# Altium footprint library Package_DFN_QFN.PcbLib: 735 footprints (part 12 of 46)
Each footprint in its own frame and in the unit in brackets; x right, y up, seen from the top. Pads: shape width x height; smd on the part's side, far side on the other; paste and mask are expansions set on the pad; w line width, h text height; cw(c..) or ccw(c..) is an arc to the next point about the centre after c.
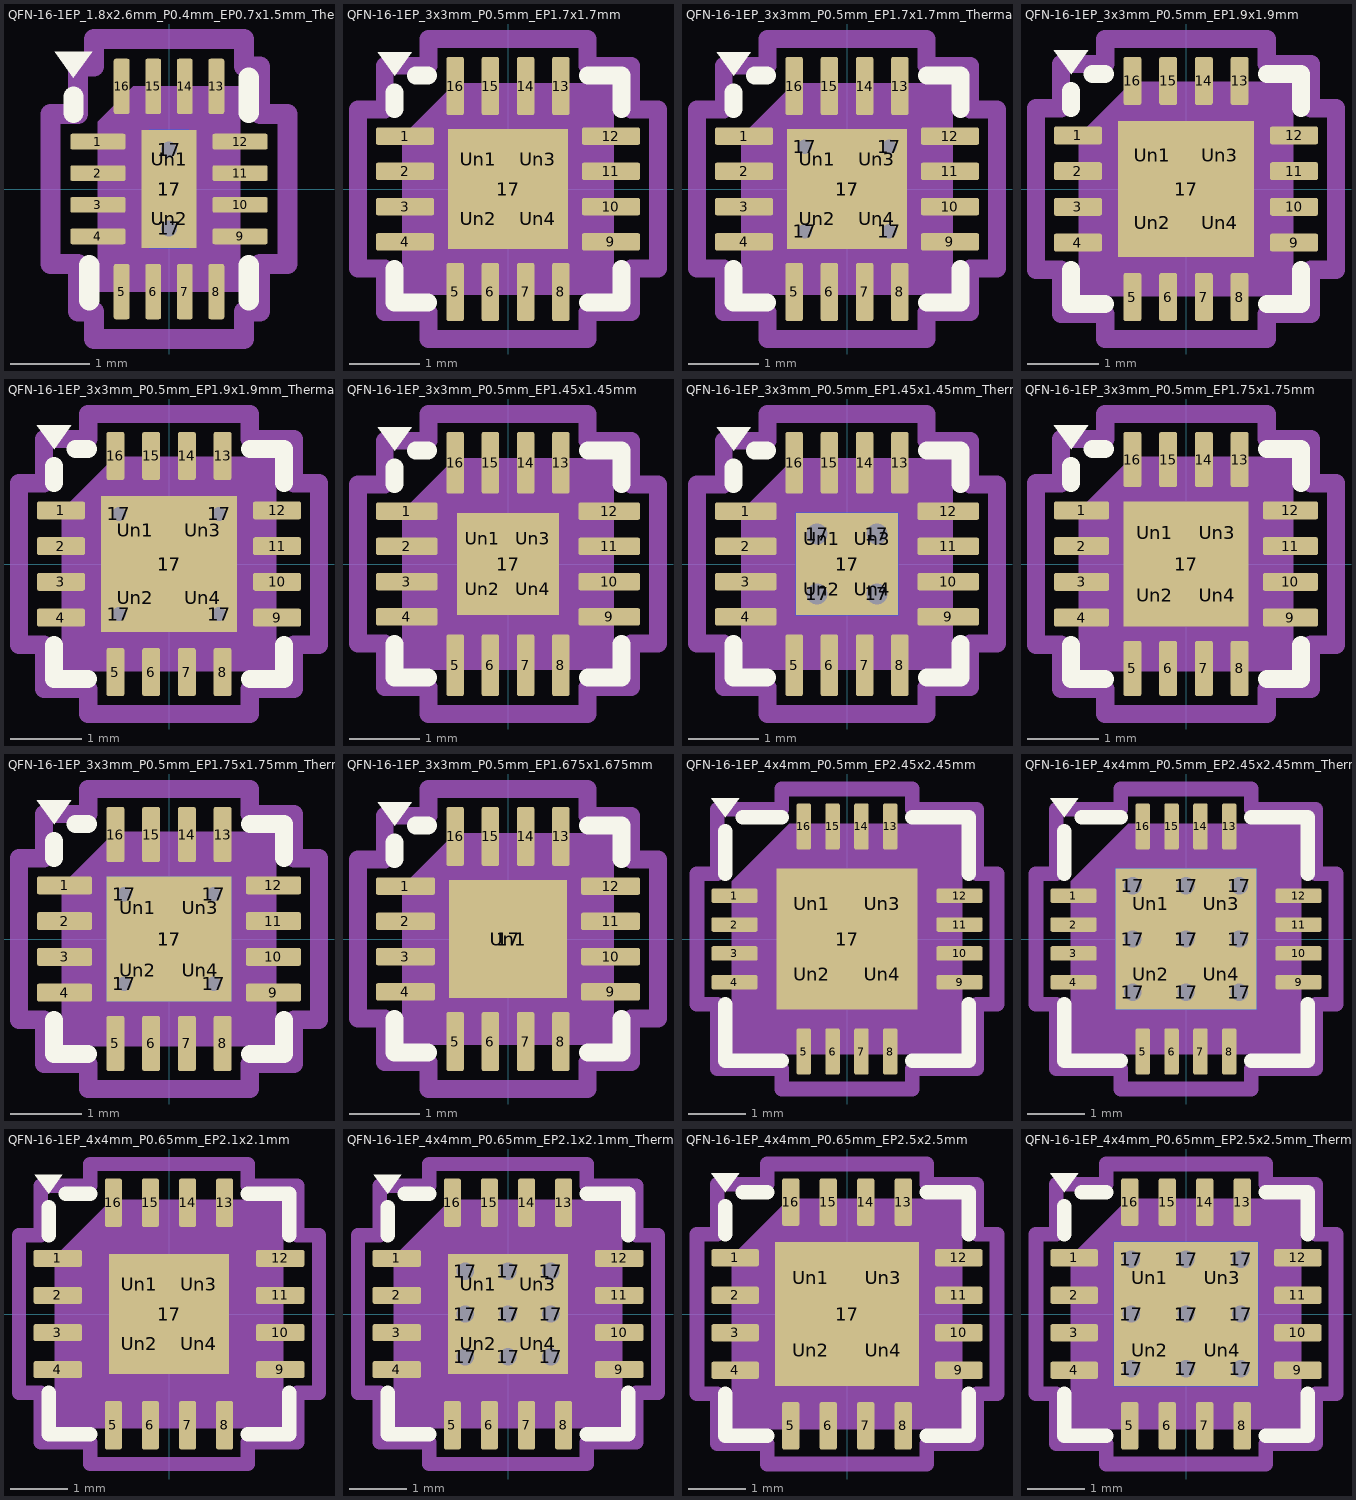
[diagram p11: the footprints below, top view; thin cyan lines are the x and y axes]

## QFN-16-1EP_1.8x2.6mm_P0.4mm_EP0.7x1.5mm_ThermalVias [mm] "QFN-16-1EP_1.8x2.6mm_P0.4mm_EP0.7x1.5mm_ThermalVias"
pads (22):
  rrect25% 0.7x0.2 smd: 1(-0.9,0.6) 2(-0.9,0.2) 3(-0.9,-0.2) 4(-0.9,-0.6) 9(0.9,-0.6) 10(0.9,-0.2) 11(0.9,0.2) 12(0.9,0.6)
  rrect25% 0.2x0.7 smd: 5(-0.6,-1.3) 6(-0.2,-1.3) 7(0.2,-1.3) 8(0.6,-1.3) 13(0.6,1.3) 14(0.2,1.3) 15(-0.2,1.3) 16(-0.6,1.3)
  round 0.5 hole 0.2: 17(0,-0.5) 17(0,0.5)
  rect 0.7x1.5 smd: 17(0,0)
  rect 0.5x1.5 smd far side: 17(0,0)
  rrect25% 0.61x0.65 on Top Paste: Un1(0,0.375) Un2(0,-0.375)
F.SilkS:
  region: -1.21,1.41 -1.45,1.74 -0.97,1.74
  lines w0.254: -1.21,0.96 -1.21,1.17 ; -1.01,-1.41 -1.01,-0.96 ; 1.01,-1.41 1.01,-0.96 ; 1.01,0.96 1.01,1.41
Top Component Center:
  lines w0.127: -0.127,0 0.127,0 -0.127,0 ; 0,-0.127 0,0.127 0,-0.127
Top Assembly:
  region: 0.9,-1.3 -0.9,-1.3 -0.9,0.85 -0.45,1.3 0.9,1.3
Top Courtyard:
  lines w0.254: -1.5,-0.95 -1.15,-0.95 -1.15,-1.55 -0.95,-1.55 -0.95,-1.9 0.95,-1.9 0.95,-1.55 1.15,-1.55 1.15,-0.95 1.5,-0.95 1.5,0.95 1.15,0.95 1.15,1.55 0.95,1.55 0.95,1.9 -0.95,1.9 -0.95,1.55 -1.15,1.55 -1.15,0.95 -1.5,0.95 -1.5,-0.95
Top Designator:
  text ".Designator" at -2.251,-0.226 h1

## QFN-16-1EP_3x3mm_P0.5mm_EP1.7x1.7mm [mm] "QFN-16-1EP_3x3mm_P0.5mm_EP1.7x1.7mm"
pads (21):
  rrect25% 0.825x0.25 smd: 1(-1.462,0.75) 2(-1.462,0.25) 3(-1.462,-0.25) 4(-1.462,-0.75) 9(1.462,-0.75) 10(1.462,-0.25) 11(1.462,0.25) 12(1.462,0.75)
  rrect25% 0.25x0.825 smd: 5(-0.75,-1.462) 6(-0.25,-1.462) 7(0.25,-1.462) 8(0.75,-1.462) 13(0.75,1.462) 14(0.25,1.462) 15(-0.25,1.462) 16(-0.75,1.462)
  rect 1.7x1.7 smd: 17(0,0)
  rrect25% 0.69x0.69 on Top Paste: Un1(-0.425,0.425) Un2(-0.425,-0.425) Un3(0.425,0.425) Un4(0.425,-0.425)
F.SilkS:
  region: -1.61,1.61 -1.85,1.94 -1.37,1.94
  lines w0.254: -1.61,-1.135 -1.61,-1.61 -1.135,-1.61 ; -1.61,1.135 -1.61,1.37 ; -1.31,1.61 -1.135,1.61 ; 1.135,-1.61 1.61,-1.61 1.61,-1.135 ; 1.135,1.61 1.61,1.61 1.61,1.135
Top Component Center:
  lines w0.127: -0.127,0 0.127,0 -0.127,0 ; 0,-0.127 0,0.127 0,-0.127
Top Assembly:
  region: 1.5,-1.5 -1.5,-1.5 -1.5,0.75 -0.75,1.5 1.5,1.5
Top Courtyard:
  lines w0.254: -2.13,-1.13 -1.75,-1.13 -1.75,-1.75 -1.13,-1.75 -1.13,-2.13 1.13,-2.13 1.13,-1.75 1.75,-1.75 1.75,-1.13 2.13,-1.13 2.13,1.13 1.75,1.13 1.75,1.75 1.13,1.75 1.13,2.13 -1.13,2.13 -1.13,1.75 -1.75,1.75 -1.75,1.13 -2.13,1.13 -2.13,-1.13
Top Designator:
  text ".Designator" at -3.43,-0.344 h1.52
3D body "QFN-16-1EP_3x3mm_P0.5mm_EP1.7x1.7mm.step": height 0.78, standoff 0, extent -1.5,-1.5 1.5,1.5

## QFN-16-1EP_3x3mm_P0.5mm_EP1.7x1.7mm_ThermalVias [mm] "QFN-16-1EP_3x3mm_P0.5mm_EP1.7x1.7mm_ThermalVias"
pads (26):
  rrect25% 0.825x0.25 smd: 1(-1.462,0.75) 2(-1.462,0.25) 3(-1.462,-0.25) 4(-1.462,-0.75) 9(1.462,-0.75) 10(1.462,-0.25) 11(1.462,0.25) 12(1.462,0.75)
  rrect25% 0.25x0.825 smd: 5(-0.75,-1.462) 6(-0.25,-1.462) 7(0.25,-1.462) 8(0.75,-1.462) 13(0.75,1.462) 14(0.25,1.462) 15(-0.25,1.462) 16(-0.75,1.462)
  round 0.5 hole 0.2: 17(-0.6,-0.6) 17(-0.6,0.6) 17(0.6,-0.6) 17(0.6,0.6)
  rect 1.7x1.7 smd: 17(0,0)
  rect 1.7x1.7 smd far side: 17(0,0)
  rrect25% 0.69x0.69 on Top Paste: Un1(-0.425,0.425) Un2(-0.425,-0.425) Un3(0.425,0.425) Un4(0.425,-0.425)
F.SilkS:
  region: -1.61,1.61 -1.85,1.94 -1.37,1.94
  lines w0.254: -1.61,-1.135 -1.61,-1.61 -1.135,-1.61 ; -1.61,1.135 -1.61,1.37 ; -1.31,1.61 -1.135,1.61 ; 1.135,-1.61 1.61,-1.61 1.61,-1.135 ; 1.135,1.61 1.61,1.61 1.61,1.135
Top Component Center:
  lines w0.127: -0.127,0 0.127,0 -0.127,0 ; 0,-0.127 0,0.127 0,-0.127
Top Assembly:
  region: 1.5,-1.5 -1.5,-1.5 -1.5,0.75 -0.75,1.5 1.5,1.5
Top Courtyard:
  lines w0.254: -2.13,-1.13 -2.13,1.13 -1.75,1.13 -1.75,1.75 -1.13,1.75 -1.13,2.13 1.13,2.13 1.13,1.75 1.75,1.75 1.75,1.13 2.13,1.13 2.13,-1.13 1.75,-1.13 1.75,-1.75 1.13,-1.75 1.13,-2.13 -1.13,-2.13 -1.13,-1.75 -1.75,-1.75 -1.75,-1.13 -2.13,-1.13
Top Designator:
  text ".Designator" at -3.43,-0.344 h1.52
3D body "QFN-16-1EP_3x3mm_P0.5mm_EP1.7x1.7mm.step": height 0.78, standoff 0, extent -1.5,-1.5 1.5,1.5

## QFN-16-1EP_3x3mm_P0.5mm_EP1.9x1.9mm [mm] "QFN-16-1EP_3x3mm_P0.5mm_EP1.9x1.9mm"
pads (21):
  rrect25% 0.675x0.25 smd: 1(-1.512,0.75) 2(-1.512,0.25) 3(-1.512,-0.25) 4(-1.512,-0.75) 9(1.512,-0.75) 10(1.512,-0.25) 11(1.512,0.25) 12(1.512,0.75)
  rrect25% 0.25x0.675 smd: 5(-0.75,-1.512) 6(-0.25,-1.512) 7(0.25,-1.512) 8(0.75,-1.512) 13(0.75,1.512) 14(0.25,1.512) 15(-0.25,1.512) 16(-0.75,1.512)
  rect 1.9x1.9 smd: 17(0,0)
  rrect25% 0.77x0.77 on Top Paste: Un1(-0.475,0.475) Un2(-0.475,-0.475) Un3(0.475,0.475) Un4(0.475,-0.475)
F.SilkS:
  region: -1.61,1.61 -1.85,1.94 -1.37,1.94
  lines w0.254: -1.61,-1.135 -1.61,-1.61 -1.135,-1.61 ; -1.61,1.135 -1.61,1.37 ; -1.31,1.61 -1.135,1.61 ; 1.135,-1.61 1.61,-1.61 1.61,-1.135 ; 1.135,1.61 1.61,1.61 1.61,1.135
Top Component Center:
  lines w0.127: -0.127,0 0.127,0 -0.127,0 ; 0,-0.127 0,0.127 0,-0.127
Top Assembly:
  region: 1.5,-1.5 -1.5,-1.5 -1.5,0.75 -0.75,1.5 1.5,1.5
Top Courtyard:
  lines w0.254: -2.1,-1.13 -2.1,1.13 -1.75,1.13 -1.75,1.75 -1.13,1.75 -1.13,2.1 1.13,2.1 1.13,1.75 1.75,1.75 1.75,1.13 2.1,1.13 2.1,-1.13 1.75,-1.13 1.75,-1.75 1.13,-1.75 1.13,-2.1 -1.13,-2.1 -1.13,-1.75 -1.75,-1.75 -1.75,-1.13 -2.1,-1.13
Top Designator:
  text ".Designator" at -3.43,-0.344 h1.52
3D body "QFN-16-1EP_3x3mm_P0.5mm_EP1.8x1.8mm.step": height 0.77, standoff 0, extent -1.5,-1.5 1.5,1.5

## QFN-16-1EP_3x3mm_P0.5mm_EP1.9x1.9mm_ThermalVias [mm] "QFN-16-1EP_3x3mm_P0.5mm_EP1.9x1.9mm_ThermalVias"
pads (26):
  rrect25% 0.675x0.25 smd: 1(-1.512,0.75) 2(-1.512,0.25) 3(-1.512,-0.25) 4(-1.512,-0.75) 9(1.512,-0.75) 10(1.512,-0.25) 11(1.512,0.25) 12(1.512,0.75)
  rrect25% 0.25x0.675 smd: 5(-0.75,-1.512) 6(-0.25,-1.512) 7(0.25,-1.512) 8(0.75,-1.512) 13(0.75,1.512) 14(0.25,1.512) 15(-0.25,1.512) 16(-0.75,1.512)
  round 0.5 hole 0.2: 17(-0.7,-0.7) 17(-0.7,0.7) 17(0.7,-0.7) 17(0.7,0.7)
  rect 1.9x1.9 smd: 17(0,0)
  rect 1.9x1.9 smd far side: 17(0,0)
  rrect25% 0.82x0.82 on Top Paste: Un1(-0.475,0.475) Un2(-0.475,-0.475) Un3(0.475,0.475) Un4(0.475,-0.475)
F.SilkS:
  region: -1.61,1.61 -1.85,1.94 -1.37,1.94
  lines w0.254: -1.61,-1.135 -1.61,-1.61 -1.135,-1.61 ; -1.61,1.135 -1.61,1.37 ; -1.31,1.61 -1.135,1.61 ; 1.135,-1.61 1.61,-1.61 1.61,-1.135 ; 1.135,1.61 1.61,1.61 1.61,1.135
Top Component Center:
  lines w0.127: -0.127,0 0.127,0 -0.127,0 ; 0,-0.127 0,0.127 0,-0.127
Top Assembly:
  region: 1.5,-1.5 -1.5,-1.5 -1.5,0.75 -0.75,1.5 1.5,1.5
Top Courtyard:
  lines w0.254: -2.1,-1.13 -1.75,-1.13 -1.75,-1.75 -1.13,-1.75 -1.13,-2.1 1.13,-2.1 1.13,-1.75 1.75,-1.75 1.75,-1.13 2.1,-1.13 2.1,1.13 1.75,1.13 1.75,1.75 1.13,1.75 1.13,2.1 -1.13,2.1 -1.13,1.75 -1.75,1.75 -1.75,1.13 -2.1,1.13 -2.1,-1.13
Top Designator:
  text ".Designator" at -3.43,-0.344 h1.52
3D body "QFN-16-1EP_3x3mm_P0.5mm_EP1.8x1.8mm.step": height 0.77, standoff 0, extent -1.5,-1.5 1.5,1.5

## QFN-16-1EP_3x3mm_P0.5mm_EP1.45x1.45mm [mm] "QFN-16-1EP_3x3mm_P0.5mm_EP1.45x1.45mm"
pads (21):
  rrect25% 0.875x0.25 smd: 1(-1.438,0.75) 2(-1.438,0.25) 3(-1.438,-0.25) 4(-1.438,-0.75) 9(1.438,-0.75) 10(1.438,-0.25) 11(1.438,0.25) 12(1.438,0.75)
  rrect25% 0.25x0.875 smd: 5(-0.75,-1.438) 6(-0.25,-1.438) 7(0.25,-1.438) 8(0.75,-1.438) 13(0.75,1.438) 14(0.25,1.438) 15(-0.25,1.438) 16(-0.75,1.438)
  rect 1.45x1.45 smd: 17(0,0)
  rrect25% 0.58x0.58 on Top Paste: Un1(-0.36,0.36) Un2(-0.36,-0.36) Un3(0.36,0.36) Un4(0.36,-0.36)
F.SilkS:
  region: -1.61,1.61 -1.85,1.94 -1.37,1.94
  lines w0.254: -1.61,-1.135 -1.61,-1.61 -1.135,-1.61 ; -1.61,1.135 -1.61,1.37 ; -1.31,1.61 -1.135,1.61 ; 1.135,-1.61 1.61,-1.61 1.61,-1.135 ; 1.135,1.61 1.61,1.61 1.61,1.135
Top Component Center:
  lines w0.127: -0.127,0 0.127,0 -0.127,0 ; 0,-0.127 0,0.127 0,-0.127
Top Assembly:
  region: 1.5,-1.5 -1.5,-1.5 -1.5,0.75 -0.75,1.5 1.5,1.5
Top Courtyard:
  lines w0.254: -2.13,-1.13 -2.13,1.13 -1.75,1.13 -1.75,1.75 -1.13,1.75 -1.13,2.13 1.13,2.13 1.13,1.75 1.75,1.75 1.75,1.13 2.13,1.13 2.13,-1.13 1.75,-1.13 1.75,-1.75 1.13,-1.75 1.13,-2.13 -1.13,-2.13 -1.13,-1.75 -1.75,-1.75 -1.75,-1.13 -2.13,-1.13
Top Designator:
  text ".Designator" at -3.43,-0.344 h1.52
3D body "QFN-16-1EP_3x3mm_P0.5mm_EP1.7x1.7mm.step": height 0.78, standoff 0, extent -1.5,-1.5 1.5,1.5

## QFN-16-1EP_3x3mm_P0.5mm_EP1.45x1.45mm_ThermalVias [mm] "QFN-16-1EP_3x3mm_P0.5mm_EP1.45x1.45mm_ThermalVias"
pads (26):
  rrect25% 0.875x0.25 smd: 1(-1.438,0.75) 2(-1.438,0.25) 3(-1.438,-0.25) 4(-1.438,-0.75) 9(1.438,-0.75) 10(1.438,-0.25) 11(1.438,0.25) 12(1.438,0.75)
  rrect25% 0.25x0.875 smd: 5(-0.75,-1.438) 6(-0.25,-1.438) 7(0.25,-1.438) 8(0.75,-1.438) 13(0.75,1.438) 14(0.25,1.438) 15(-0.25,1.438) 16(-0.75,1.438)
  round 0.6 hole 0.3: 17(-0.425,-0.425) 17(-0.425,0.425) 17(0.425,-0.425) 17(0.425,0.425)
  rect 1.45x1.45 smd: 17(0,0)
  rect 1.45x1.45 smd far side: 17(0,0)
  rrect25% 0.63x0.63 on Top Paste: Un1(-0.36,0.36) Un2(-0.36,-0.36) Un3(0.36,0.36) Un4(0.36,-0.36)
F.SilkS:
  region: -1.61,1.61 -1.85,1.94 -1.37,1.94
  lines w0.254: -1.61,-1.135 -1.61,-1.61 -1.135,-1.61 ; -1.61,1.135 -1.61,1.37 ; -1.31,1.61 -1.135,1.61 ; 1.135,-1.61 1.61,-1.61 1.61,-1.135 ; 1.135,1.61 1.61,1.61 1.61,1.135
Top Component Center:
  lines w0.127: -0.127,0 0.127,0 -0.127,0 ; 0,-0.127 0,0.127 0,-0.127
Top Assembly:
  region: 1.5,-1.5 -1.5,-1.5 -1.5,0.75 -0.75,1.5 1.5,1.5
Top Courtyard:
  lines w0.254: -2.13,-1.13 -2.13,1.13 -1.75,1.13 -1.75,1.75 -1.13,1.75 -1.13,2.13 1.13,2.13 1.13,1.75 1.75,1.75 1.75,1.13 2.13,1.13 2.13,-1.13 1.75,-1.13 1.75,-1.75 1.13,-1.75 1.13,-2.13 -1.13,-2.13 -1.13,-1.75 -1.75,-1.75 -1.75,-1.13 -2.13,-1.13
Top Designator:
  text ".Designator" at -3.43,-0.344 h1.52
3D body "QFN-16-1EP_3x3mm_P0.5mm_EP1.7x1.7mm.step": height 0.78, standoff 0, extent -1.5,-1.5 1.5,1.5

## QFN-16-1EP_3x3mm_P0.5mm_EP1.75x1.75mm [mm] "QFN-16-1EP_3x3mm_P0.5mm_EP1.75x1.75mm"
pads (21):
  rrect25% 0.775x0.25 smd: 1(-1.462,0.75) 2(-1.462,0.25) 3(-1.462,-0.25) 4(-1.462,-0.75) 9(1.462,-0.75) 10(1.462,-0.25) 11(1.462,0.25) 12(1.462,0.75)
  rrect25% 0.25x0.775 smd: 5(-0.75,-1.462) 6(-0.25,-1.462) 7(0.25,-1.462) 8(0.75,-1.462) 13(0.75,1.462) 14(0.25,1.462) 15(-0.25,1.462) 16(-0.75,1.462)
  rect 1.75x1.75 smd: 17(0,0)
  rrect25% 0.71x0.71 on Top Paste: Un1(-0.44,0.44) Un2(-0.44,-0.44) Un3(0.44,0.44) Un4(0.44,-0.44)
F.SilkS:
  region: -1.61,1.61 -1.85,1.94 -1.37,1.94
  lines w0.254: -1.61,-1.135 -1.61,-1.61 -1.135,-1.61 ; -1.61,1.135 -1.61,1.37 ; -1.31,1.61 -1.135,1.61 ; 1.135,-1.61 1.61,-1.61 1.61,-1.135 ; 1.135,1.61 1.61,1.61 1.61,1.135
Top Component Center:
  lines w0.127: -0.127,0 0.127,0 -0.127,0 ; 0,-0.127 0,0.127 0,-0.127
Top Assembly:
  region: 1.5,-1.5 -1.5,-1.5 -1.5,0.75 -0.75,1.5 1.5,1.5
Top Courtyard:
  lines w0.254: -2.1,-1.13 -1.75,-1.13 -1.75,-1.75 -1.13,-1.75 -1.13,-2.1 1.13,-2.1 1.13,-1.75 1.75,-1.75 1.75,-1.13 2.1,-1.13 2.1,1.13 1.75,1.13 1.75,1.75 1.13,1.75 1.13,2.1 -1.13,2.1 -1.13,1.75 -1.75,1.75 -1.75,1.13 -2.1,1.13 -2.1,-1.13
Top Designator:
  text ".Designator" at -3.43,-0.344 h1.52
3D body "QFN-16-1EP_3x3mm_P0.5mm_EP1.7x1.7mm.step": height 0.78, standoff 0, extent -1.5,-1.5 1.5,1.5

## QFN-16-1EP_3x3mm_P0.5mm_EP1.75x1.75mm_ThermalVias [mm] "QFN-16-1EP_3x3mm_P0.5mm_EP1.75x1.75mm_ThermalVias"
pads (26):
  rrect25% 0.775x0.25 smd: 1(-1.462,0.75) 2(-1.462,0.25) 3(-1.462,-0.25) 4(-1.462,-0.75) 9(1.462,-0.75) 10(1.462,-0.25) 11(1.462,0.25) 12(1.462,0.75)
  rrect25% 0.25x0.775 smd: 5(-0.75,-1.462) 6(-0.25,-1.462) 7(0.25,-1.462) 8(0.75,-1.462) 13(0.75,1.462) 14(0.25,1.462) 15(-0.25,1.462) 16(-0.75,1.462)
  round 0.5 hole 0.2: 17(-0.625,-0.625) 17(-0.625,0.625) 17(0.625,-0.625) 17(0.625,0.625)
  rect 1.75x1.75 smd: 17(0,0)
  rect 1.75x1.75 smd far side: 17(0,0)
  rrect25% 0.76x0.76 on Top Paste: Un1(-0.44,0.44) Un2(-0.44,-0.44) Un3(0.44,0.44) Un4(0.44,-0.44)
F.SilkS:
  region: -1.61,1.61 -1.85,1.94 -1.37,1.94
  lines w0.254: -1.61,-1.135 -1.61,-1.61 -1.135,-1.61 ; -1.61,1.135 -1.61,1.37 ; -1.31,1.61 -1.135,1.61 ; 1.135,-1.61 1.61,-1.61 1.61,-1.135 ; 1.135,1.61 1.61,1.61 1.61,1.135
Top Component Center:
  lines w0.127: -0.127,0 0.127,0 -0.127,0 ; 0,-0.127 0,0.127 0,-0.127
Top Assembly:
  region: 1.5,-1.5 -1.5,-1.5 -1.5,0.75 -0.75,1.5 1.5,1.5
Top Courtyard:
  lines w0.254: -2.1,-1.13 -2.1,1.13 -1.75,1.13 -1.75,1.75 -1.13,1.75 -1.13,2.1 1.13,2.1 1.13,1.75 1.75,1.75 1.75,1.13 2.1,1.13 2.1,-1.13 1.75,-1.13 1.75,-1.75 1.13,-1.75 1.13,-2.1 -1.13,-2.1 -1.13,-1.75 -1.75,-1.75 -1.75,-1.13 -2.1,-1.13
Top Designator:
  text ".Designator" at -3.43,-0.344 h1.52
3D body "QFN-16-1EP_3x3mm_P0.5mm_EP1.7x1.7mm.step": height 0.78, standoff 0, extent -1.5,-1.5 1.5,1.5

## QFN-16-1EP_3x3mm_P0.5mm_EP1.675x1.675mm [mm] "QFN-16-1EP_3x3mm_P0.5mm_EP1.675x1.675mm"
pads (18):
  rrect25% 0.837x0.25 smd: 1(-1.456,0.75) 2(-1.456,0.25) 3(-1.456,-0.25) 4(-1.456,-0.75) 9(1.456,-0.75) 10(1.456,-0.25) 11(1.456,0.25) 12(1.456,0.75)
  rrect25% 0.25x0.837 smd: 5(-0.75,-1.456) 6(-0.25,-1.456) 7(0.25,-1.456) 8(0.75,-1.456) 13(0.75,1.456) 14(0.25,1.456) 15(-0.25,1.456) 16(-0.75,1.456)
  rect 1.675x1.675 smd: 17(0,0)
  rrect19% 1.35x1.35 on Top Paste: Un1(0,0)
F.SilkS:
  region: -1.61,1.61 -1.85,1.94 -1.37,1.94
  lines w0.254: -1.61,-1.135 -1.61,-1.61 -1.135,-1.61 ; -1.61,1.135 -1.61,1.37 ; -1.31,1.61 -1.135,1.61 ; 1.135,-1.61 1.61,-1.61 1.61,-1.135 ; 1.135,1.61 1.61,1.61 1.61,1.135
Top Component Center:
  lines w0.127: -0.127,0 0.127,0 -0.127,0 ; 0,-0.127 0,0.127 0,-0.127
Top Assembly:
  region: 1.5,-1.5 -1.5,-1.5 -1.5,0.75 -0.75,1.5 1.5,1.5
Top Courtyard:
  lines w0.254: -2.13,-1.13 -1.75,-1.13 -1.75,-1.75 -1.13,-1.75 -1.13,-2.13 1.13,-2.13 1.13,-1.75 1.75,-1.75 1.75,-1.13 2.13,-1.13 2.13,1.13 1.75,1.13 1.75,1.75 1.13,1.75 1.13,2.13 -1.13,2.13 -1.13,1.75 -1.75,1.75 -1.75,1.13 -2.13,1.13 -2.13,-1.13
Top Designator:
  text ".Designator" at -3.43,-0.344 h1.52
3D body "QFN-16-1EP_3x3mm_P0.5mm_EP1.7x1.7mm.step": height 0.78, standoff 0, extent -1.5,-1.5 1.5,1.5

## QFN-16-1EP_4x4mm_P0.5mm_EP2.45x2.45mm [mm] "QFN-16-1EP_4x4mm_P0.5mm_EP2.45x2.45mm"
pads (21):
  rrect25% 0.8x0.25 smd: 1(-1.95,0.75) 2(-1.95,0.25) 3(-1.95,-0.25) 4(-1.95,-0.75) 9(1.95,-0.75) 10(1.95,-0.25) 11(1.95,0.25) 12(1.95,0.75)
  rrect25% 0.25x0.8 smd: 5(-0.75,-1.95) 6(-0.25,-1.95) 7(0.25,-1.95) 8(0.75,-1.95) 13(0.75,1.95) 14(0.25,1.95) 15(-0.25,1.95) 16(-0.75,1.95)
  rect 2.45x2.45 smd: 17(0,0)
  rrect25% 0.99x0.99 on Top Paste: Un1(-0.61,0.61) Un2(-0.61,-0.61) Un3(0.61,0.61) Un4(0.61,-0.61)
F.SilkS:
  region: -2.11,2.11 -2.35,2.44 -1.87,2.44
  lines w0.254: -2.11,-1.135 -2.11,-2.11 -1.135,-2.11 ; -2.11,1.135 -2.11,1.87 ; -1.81,2.11 -1.135,2.11 ; 1.135,-2.11 2.11,-2.11 2.11,-1.135 ; 1.135,2.11 2.11,2.11 2.11,1.135
Top Component Center:
  lines w0.127: -0.127,0 0.127,0 -0.127,0 ; 0,-0.127 0,0.127 0,-0.127
Top Assembly:
  region: 2,-2 -2,-2 -2,1 -1,2 2,2
Top Courtyard:
  lines w0.254: -2.6,-1.13 -2.25,-1.13 -2.25,-2.25 -1.13,-2.25 -1.13,-2.6 1.13,-2.6 1.13,-2.25 2.25,-2.25 2.25,-1.13 2.6,-1.13 2.6,1.13 2.25,1.13 2.25,2.25 1.13,2.25 1.13,2.6 -1.13,2.6 -1.13,2.25 -2.25,2.25 -2.25,1.13 -2.6,1.13 -2.6,-1.13
Top Designator:
  text ".Designator" at -3.43,-0.344 h1.52

## QFN-16-1EP_4x4mm_P0.5mm_EP2.45x2.45mm_ThermalVias [mm] "QFN-16-1EP_4x4mm_P0.5mm_EP2.45x2.45mm_ThermalVias"
pads (31):
  rrect25% 0.8x0.25 smd: 1(-1.95,0.75) 2(-1.95,0.25) 3(-1.95,-0.25) 4(-1.95,-0.75) 9(1.95,-0.75) 10(1.95,-0.25) 11(1.95,0.25) 12(1.95,0.75)
  rrect25% 0.25x0.8 smd: 5(-0.75,-1.95) 6(-0.25,-1.95) 7(0.25,-1.95) 8(0.75,-1.95) 13(0.75,1.95) 14(0.25,1.95) 15(-0.25,1.95) 16(-0.75,1.95)
  round 0.6 hole 0.3: 17(-0.925,-0.925) 17(-0.925,0) 17(-0.925,0.925) 17(0,-0.925) 17(0,0) 17(0,0.925) 17(0.925,-0.925) 17(0.925,0) 17(0.925,0.925)
  rect 2.45x2.45 smd: 17(0,0)
  rect 2.45x2.45 smd far side: 17(0,0)
  rrect24% 1.06x1.06 on Top Paste: Un1(-0.61,0.61) Un2(-0.61,-0.61) Un3(0.61,0.61) Un4(0.61,-0.61)
F.SilkS:
  region: -2.11,2.11 -2.35,2.44 -1.87,2.44
  lines w0.254: -2.11,-1.135 -2.11,-2.11 -1.135,-2.11 ; -2.11,1.135 -2.11,1.87 ; -1.81,2.11 -1.135,2.11 ; 1.135,-2.11 2.11,-2.11 2.11,-1.135 ; 1.135,2.11 2.11,2.11 2.11,1.135
Top Component Center:
  lines w0.127: -0.127,0 0.127,0 -0.127,0 ; 0,-0.127 0,0.127 0,-0.127
Top Assembly:
  region: 2,-2 -2,-2 -2,1 -1,2 2,2
Top Courtyard:
  lines w0.254: -2.6,-1.13 -2.25,-1.13 -2.25,-2.25 -1.13,-2.25 -1.13,-2.6 1.13,-2.6 1.13,-2.25 2.25,-2.25 2.25,-1.13 2.6,-1.13 2.6,1.13 2.25,1.13 2.25,2.25 1.13,2.25 1.13,2.6 -1.13,2.6 -1.13,2.25 -2.25,2.25 -2.25,1.13 -2.6,1.13 -2.6,-1.13
Top Designator:
  text ".Designator" at -3.43,-0.344 h1.52

## QFN-16-1EP_4x4mm_P0.65mm_EP2.1x2.1mm [mm] "QFN-16-1EP_4x4mm_P0.65mm_EP2.1x2.1mm"
pads (21):
  rrect25% 0.85x0.3 smd: 1(-1.95,0.975) 2(-1.95,0.325) 3(-1.95,-0.325) 4(-1.95,-0.975) 9(1.95,-0.975) 10(1.95,-0.325) 11(1.95,0.325) 12(1.95,0.975)
  rrect25% 0.3x0.85 smd: 5(-0.975,-1.95) 6(-0.325,-1.95) 7(0.325,-1.95) 8(0.975,-1.95) 13(0.975,1.95) 14(0.325,1.95) 15(-0.325,1.95) 16(-0.975,1.95)
  rect 2.1x2.1 smd: 17(0,0)
  rrect25% 0.85x0.85 on Top Paste: Un1(-0.525,0.525) Un2(-0.525,-0.525) Un3(0.525,0.525) Un4(0.525,-0.525)
F.SilkS:
  region: -2.11,2.11 -2.35,2.44 -1.87,2.44
  lines w0.254: -2.11,-1.385 -2.11,-2.11 -1.385,-2.11 ; -2.11,1.385 -2.11,1.87 ; -1.81,2.11 -1.385,2.11 ; 1.385,-2.11 2.11,-2.11 2.11,-1.385 ; 1.385,2.11 2.11,2.11 2.11,1.385
Top Component Center:
  lines w0.127: -0.127,0 0.127,0 -0.127,0 ; 0,-0.127 0,0.127 0,-0.127
Top Assembly:
  region: 2,-2 -2,-2 -2,1 -1,2 2,2
Top Courtyard:
  lines w0.254: -2.63,-1.38 -2.63,1.38 -2.25,1.38 -2.25,2.25 -1.38,2.25 -1.38,2.63 1.38,2.63 1.38,2.25 2.25,2.25 2.25,1.38 2.63,1.38 2.63,-1.38 2.25,-1.38 2.25,-2.25 1.38,-2.25 1.38,-2.63 -1.38,-2.63 -1.38,-2.25 -2.25,-2.25 -2.25,-1.38 -2.63,-1.38
Top Designator:
  text ".Designator" at -3.43,-0.344 h1.52
3D body "QFN-16-1EP_4x4mm_P0.65mm_EP2.1x2.1mm.step": height 0.75, standoff 0, extent -2,-2 2,2

## QFN-16-1EP_4x4mm_P0.65mm_EP2.1x2.1mm_ThermalVias [mm] "QFN-16-1EP_4x4mm_P0.65mm_EP2.1x2.1mm_ThermalVias"
pads (31):
  rrect25% 0.85x0.3 smd: 1(-1.95,0.975) 2(-1.95,0.325) 3(-1.95,-0.325) 4(-1.95,-0.975) 9(1.95,-0.975) 10(1.95,-0.325) 11(1.95,0.325) 12(1.95,0.975)
  rrect25% 0.3x0.85 smd: 5(-0.975,-1.95) 6(-0.325,-1.95) 7(0.325,-1.95) 8(0.975,-1.95) 13(0.975,1.95) 14(0.325,1.95) 15(-0.325,1.95) 16(-0.975,1.95)
  round 0.6 hole 0.3: 17(-0.75,-0.75) 17(-0.75,0) 17(-0.75,0.75) 17(0,-0.75) 17(0,0) 17(0,0.75) 17(0.75,-0.75) 17(0.75,0) 17(0.75,0.75)
  rect 2.1x2.1 smd: 17(0,0)
  rect 2.1x2.1 smd far side: 17(0,0)
  rrect25% 0.91x0.91 on Top Paste: Un1(-0.525,0.525) Un2(-0.525,-0.525) Un3(0.525,0.525) Un4(0.525,-0.525)
F.SilkS:
  region: -2.11,2.11 -2.35,2.44 -1.87,2.44
  lines w0.254: -2.11,-1.385 -2.11,-2.11 -1.385,-2.11 ; -2.11,1.385 -2.11,1.87 ; -1.81,2.11 -1.385,2.11 ; 1.385,-2.11 2.11,-2.11 2.11,-1.385 ; 1.385,2.11 2.11,2.11 2.11,1.385
Top Component Center:
  lines w0.127: -0.127,0 0.127,0 -0.127,0 ; 0,-0.127 0,0.127 0,-0.127
Top Assembly:
  region: 2,-2 -2,-2 -2,1 -1,2 2,2
Top Courtyard:
  lines w0.254: -2.63,-1.38 -2.25,-1.38 -2.25,-2.25 -1.38,-2.25 -1.38,-2.63 1.38,-2.63 1.38,-2.25 2.25,-2.25 2.25,-1.38 2.63,-1.38 2.63,1.38 2.25,1.38 2.25,2.25 1.38,2.25 1.38,2.63 -1.38,2.63 -1.38,2.25 -2.25,2.25 -2.25,1.38 -2.63,1.38 -2.63,-1.38
Top Designator:
  text ".Designator" at -3.43,-0.344 h1.52
3D body "QFN-16-1EP_4x4mm_P0.65mm_EP2.1x2.1mm.step": height 0.75, standoff 0, extent -2,-2 2,2

## QFN-16-1EP_4x4mm_P0.65mm_EP2.5x2.5mm [mm] "QFN-16-1EP_4x4mm_P0.65mm_EP2.5x2.5mm"
pads (21):
  rrect25% 0.825x0.3 smd: 1(-1.937,0.975) 2(-1.937,0.325) 3(-1.937,-0.325) 4(-1.937,-0.975) 9(1.937,-0.975) 10(1.937,-0.325) 11(1.937,0.325) 12(1.937,0.975)
  rrect25% 0.3x0.825 smd: 5(-0.975,-1.937) 6(-0.325,-1.937) 7(0.325,-1.937) 8(0.975,-1.937) 13(0.975,1.937) 14(0.325,1.937) 15(-0.325,1.937) 16(-0.975,1.937)
  rect 2.5x2.5 smd: 17(0,0)
  rrect25% 1.01x1.01 on Top Paste: Un1(-0.625,0.625) Un2(-0.625,-0.625) Un3(0.625,0.625) Un4(0.625,-0.625)
F.SilkS:
  region: -2.11,2.11 -2.35,2.44 -1.87,2.44
  lines w0.254: -2.11,-1.385 -2.11,-2.11 -1.385,-2.11 ; -2.11,1.385 -2.11,1.87 ; -1.81,2.11 -1.385,2.11 ; 1.385,-2.11 2.11,-2.11 2.11,-1.385 ; 1.385,2.11 2.11,2.11 2.11,1.385
Top Component Center:
  lines w0.127: -0.127,0 0.127,0 -0.127,0 ; 0,-0.127 0,0.127 0,-0.127
Top Assembly:
  region: 2,-2 -2,-2 -2,1 -1,2 2,2
Top Courtyard:
  lines w0.254: -2.6,-1.38 -2.25,-1.38 -2.25,-2.25 -1.38,-2.25 -1.38,-2.6 1.38,-2.6 1.38,-2.25 2.25,-2.25 2.25,-1.38 2.6,-1.38 2.6,1.38 2.25,1.38 2.25,2.25 1.38,2.25 1.38,2.6 -1.38,2.6 -1.38,2.25 -2.25,2.25 -2.25,1.38 -2.6,1.38 -2.6,-1.38
Top Designator:
  text ".Designator" at -3.43,-0.344 h1.52
3D body "QFN-16-1EP_4x4mm_P0.65mm_EP2.5x2.5mm.step": height 0.77, standoff 0, extent -2,-2 2,2

## QFN-16-1EP_4x4mm_P0.65mm_EP2.5x2.5mm_ThermalVias [mm] "QFN-16-1EP_4x4mm_P0.65mm_EP2.5x2.5mm_ThermalVias"
pads (31):
  rrect25% 0.825x0.3 smd: 1(-1.937,0.975) 2(-1.937,0.325) 3(-1.937,-0.325) 4(-1.937,-0.975) 9(1.937,-0.975) 10(1.937,-0.325) 11(1.937,0.325) 12(1.937,0.975)
  rrect25% 0.3x0.825 smd: 5(-0.975,-1.937) 6(-0.325,-1.937) 7(0.325,-1.937) 8(0.975,-1.937) 13(0.975,1.937) 14(0.325,1.937) 15(-0.325,1.937) 16(-0.975,1.937)
  round 0.6 hole 0.3: 17(-0.95,-0.95) 17(-0.95,0) 17(-0.95,0.95) 17(0,-0.95) 17(0,0) 17(0,0.95) 17(0.95,-0.95) 17(0.95,0) 17(0.95,0.95)
  rect 2.5x2.5 smd: 17(0,0)
  rect 2.5x2.5 smd far side: 17(0,0)
  rrect23% 1.08x1.08 on Top Paste: Un1(-0.625,0.625) Un2(-0.625,-0.625) Un3(0.625,0.625) Un4(0.625,-0.625)
F.SilkS:
  region: -2.11,2.11 -2.35,2.44 -1.87,2.44
  lines w0.254: -2.11,-1.385 -2.11,-2.11 -1.385,-2.11 ; -2.11,1.385 -2.11,1.87 ; -1.81,2.11 -1.385,2.11 ; 1.385,-2.11 2.11,-2.11 2.11,-1.385 ; 1.385,2.11 2.11,2.11 2.11,1.385
Top Component Center:
  lines w0.127: -0.127,0 0.127,0 -0.127,0 ; 0,-0.127 0,0.127 0,-0.127
Top Assembly:
  region: 2,-2 -2,-2 -2,1 -1,2 2,2
Top Courtyard:
  lines w0.254: -2.6,-1.38 -2.6,1.38 -2.25,1.38 -2.25,2.25 -1.38,2.25 -1.38,2.6 1.38,2.6 1.38,2.25 2.25,2.25 2.25,1.38 2.6,1.38 2.6,-1.38 2.25,-1.38 2.25,-2.25 1.38,-2.25 1.38,-2.6 -1.38,-2.6 -1.38,-2.25 -2.25,-2.25 -2.25,-1.38 -2.6,-1.38
Top Designator:
  text ".Designator" at -3.43,-0.344 h1.52